# Altium footprint library PCB1.PcbLib: 10 footprints
Each footprint in its own frame and in the unit in brackets; x right, y up, seen from the top. Pads: shape width x height; smd on the part's side, far side on the other; paste and mask are expansions set on the pad; w line width, h text height; cw(c..) or ccw(c..) is an arc to the next point about the centre after c.
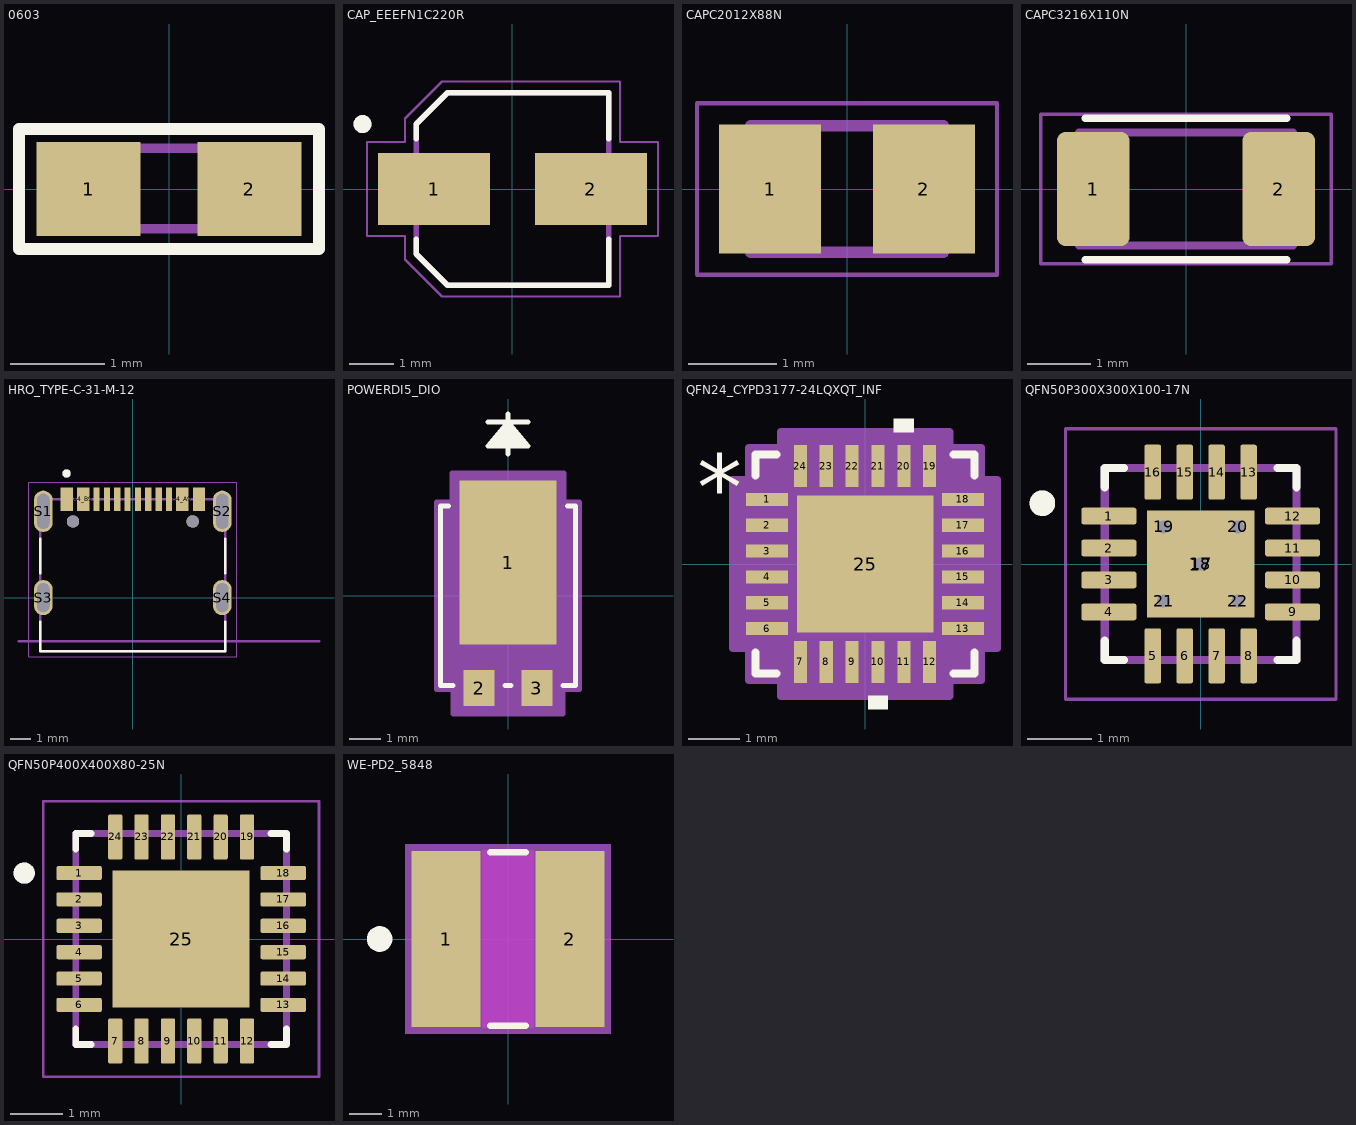
[diagram p0: the footprints below, top view; thin cyan lines are the x and y axes]

## 0603 [mm]
pads (2):
  rect 1.1x1 smd: 1(-0.85,0) 2(0.85,0)
Top Overlay:
  lines w0.127: -1.587,-0.635 -1.587,0.635 1.587,0.635 1.587,-0.635 -1.587,-0.635
Mechanical 13:
  region: -0.338,-0.47 -0.838,-0.47 -0.838,0.48 -0.338,0.48
  region: 0.83,-0.47 0.33,-0.47 0.33,0.48 0.83,0.48
  lines w0.102: -0.356,-0.419 0.356,-0.419 ; -0.356,0.432 0.356,0.432
3D body "step_temp.STEP": height 0.55, standoff 0, extent -0.8,-0.4 0.8,0.4

## CAP_EEEFN1C220R [mm]
pads (2):
  rect 2.5x1.6 smd: 1(-1.75,0) 2(1.75,0)
Top Overlay:
  circle w0.2: c-3.35,1.45 r0.1
  lines w0.127: -2.15,-1.12 -2.15,-1.45 -1.45,-2.15 2.15,-2.15 2.15,-1.12 ; -2.15,1.12 -2.15,1.45 -1.45,2.15 2.15,2.15 2.15,1.12
Mechanical 13:
  circle w0.2: c-3.35,1.45 r0.1
  lines w0.127: -2.15,-1.45 -2.15,1.45 -1.45,2.15 2.15,2.15 2.15,-2.15 -1.45,-2.15 -2.15,-1.45
Mechanical 15:
  lines w0.05: -3.25,-1.05 -2.4,-1.05 -2.4,-1.575 -1.575,-2.4 2.4,-2.4 2.4,-1.05 3.25,-1.05 3.25,1.05 2.4,1.05 2.4,2.4 -1.575,2.4 -2.4,1.575 -2.4,1.05 -3.25,1.05 -3.25,-1.05
3D body "step_temp.STEP": height 5.3, standoff -0.5, extent -2.5,-2.15 2.5,2.15

## CAPC2012X88N [mm]
pads (2):
  rect 1.16x1.47 smd: 1(-0.875,0) 2(0.875,0)
Mechanical 13:
  lines w0.127: -1.1,-0.72 -1.1,0.72 1.1,0.72 1.1,-0.72 -1.1,-0.72
Mechanical 15:
  lines w0.05: -1.708,-0.975 -1.708,0.975 1.708,0.975 1.708,-0.975 -1.708,-0.975
3D body "step_temp.STEP": height 1.4, standoff 0, extent -1.016,-0.635 1.016,0.635

## CAPC3216X110N [mm]
pads (2):
  rrect25% 1.16x1.82 smd: 1(-1.475,0) 2(1.475,0)
Top Overlay:
  lines w0.127: -1.6,-1.125 1.6,-1.125 ; -1.6,1.125 1.6,1.125
Mechanical 13:
  lines w0.127: -1.7,-0.9 -1.7,0.9 1.7,0.9 1.7,-0.9 -1.7,-0.9
Mechanical 15:
  lines w0.05: -2.31,-1.189 -2.31,1.189 2.31,1.189 2.31,-1.189 -2.31,-1.189
3D body "step_temp.STEP": height 1.8, standoff 0, extent -1.6,-0.8 1.6,0.8

## HRO_TYPE-C-31-M-12 [mm]
pads (18):
  rect 0.6x1.14 smd mask+0.05: A1_B12(-3.2,4.75) A4_B9(-2.4,4.75) B1_A12(3.2,4.75) B4_A9(2.4,4.75)
  rect 0.3x1.14 smd mask+0.05: A5(-1.25,4.75) A6(-0.25,4.75) A7(0.25,4.75) A8(1.25,4.75) B5(1.75,4.75) B6(0.75,4.75) B7(-0.75,4.75) B8(-1.75,4.75)
  oval 0.9x2 hole 0.6 slot 1.7 at 90 deg: S1(-4.325,4.17) S2(4.325,4.17)
  oval 0.9x1.7 hole 0.6 slot 1.4 at 90 deg: S3(-4.325,0) S4(4.325,0)
  round 0.6 hole 0.6 unplated: ""(-2.89,3.68) ""(2.89,3.68)
Top Overlay:
  circle w0.2: c-3.2,6 r0.1
  lines w0.127: -4.47,-1.17 -4.47,-2.6 4.47,-2.6 4.47,-1.17 ; -4.47,1.17 -4.47,2.85 ; 4.47,1.17 4.47,2.85
Mechanical 13:
  circle w0.2: c-3.2,6 r0.1
  lines w0.127: -5.5,-2.11 9,-2.11 ; -4.47,-2.6 -4.47,4.75 4.47,4.75 4.47,-2.6 -4.47,-2.6
  text "PCB EDGE" at 5.2,-1.9 h0.61
Mechanical 15:
  lines w0.05: -5.025,-2.85 5.025,-2.85 5.025,5.57 -5.025,5.57 -5.025,-2.85
3D body "step_temp.STEP": height 3.18, standoff -1.12, extent -4.47,-2.6 4.47,5.305

## POWERDI5_DIO [mil]
pads (3):
  rect 122x205 smd paste+0 mask+0: 1(0,41.5)
  rect 39x45 smd paste+0 mask+0: 2(-36.22,-115.5) 3(36.22,-115.5)
Top Overlay:
  lines w6: -74.1,112.5 -84.5,112.5 -84.5,-112.5 -68.82,-112.5 ; -25,217.5 25,217.5 ; -20,187.5 0,217.5 ; -15,187.5 0,217.5 ; -10,187.5 0,217.5 ; -5,187.5 0,217.5 ; -3.62,-112.5 3.62,-112.5 ; 0,177.5 0,227.5 ; 5,187.5 0,217.5 ; 10,187.5 0,217.5 ; 15,187.5 0,217.5 ; 20,187.5 0,217.5 ; 68.82,-112.5 84.5,-112.5 84.5,112.5 74.1,112.5 ; 0,217.5 25,187.5 -25,187.5 0,217.5
  text ".Designator" at -137.5,-25 h50
Mechanical 13:
  lines w1: -25,217.5 25,217.5 ; -20,187.5 0,217.5 ; -15,187.5 0,217.5 ; -10,187.5 0,217.5 ; -5,187.5 0,217.5 ; 0,177.5 0,227.5 ; 5,187.5 0,217.5 ; 10,187.5 0,217.5 ; 15,187.5 0,217.5 ; 20,187.5 0,217.5 ; 0,217.5 25,187.5 -25,187.5 0,217.5 ; -79.5,-107.5 79.5,-107.5 79.5,107.5 -79.5,107.5 -79.5,-107.5
  text ".Designator" at -137.5,-25 h50
Mechanical 15:
  region: -68.72,-117.5 -89.5,-117.5 -89.5,117.5 -70,117.5 -70,154 70,154 70,117.5 89.5,117.5 89.5,-117.5 68.72,-117.5 68.72,-148 -68.72,-148
  region: 79.5,-107.5 -79.5,-107.5 -79.5,107.5 79.5,107.5
  lines w6: -89.5,-117.5 -89.5,117.5 -70,117.5 -70,154 70,154 70,117.5 89.5,117.5 89.5,-117.5 68.72,-117.5 68.72,-148 -68.72,-148 -68.72,-117.5 -89.5,-117.5
3D body "POWERDI5_DIO.step": height 47.09, standoff 0, extent -79.49,-130 79.49,130

## QFN24_CYPD3177-24LQXQT_INF [mil]
pads (25):
  rect 32x10 smd paste-99999 mask+0: 1(-74.5,49.21) 2(-74.5,29.53) 3(-74.5,9.84) 4(-74.5,-9.84) 5(-74.5,-29.53) 6(-74.5,-49.21) 13(74.5,-49.21) 14(74.5,-29.53) 15(74.5,-9.84) 16(74.5,9.84) 17(74.5,29.53) 18(74.5,49.21)
  rect 10x32 smd paste-99999 mask+0: 7(-49.21,-74.5) 8(-29.53,-74.5) 9(-9.84,-74.5) 10(9.84,-74.5) 11(29.53,-74.5) 12(49.21,-74.5) 19(49.21,74.5) 20(29.53,74.5) 21(9.84,74.5) 22(-9.84,74.5) 23(-29.53,74.5) 24(-49.21,74.5)
  rect 104x104 smd paste-99999 mask+0: 25(0,0)
Top Overlay:
  region: 37.03,100.5 22.03,100.5 22.03,110.5 37.03,110.5
  region: 17.34,-100.5 2.34,-100.5 2.34,-110.5 17.34,-110.5
  lines w6: -83.5,-67.31 -83.5,-83.5 -67.31,-83.5 ; -83.5,67.31 -83.5,83.5 -67.31,83.5 ; 67.31,-83.5 83.5,-83.5 83.5,-67.31 ; 67.31,83.5 83.5,83.5 83.5,67.31
  text ".Designator" at -137.5,-25 h50
  text "*" at -128,34.06 h50
Top Paste:
  region: 48.06,-3.94 3.94,-3.94 3.94,-48.06 48.06,-48.06
  region: 48.06,48.06 3.94,48.06 3.94,3.94 48.06,3.94
  region: -3.94,-3.94 -48.06,-3.94 -48.06,-48.06 -3.94,-48.06
  region: -3.94,48.06 -48.06,48.06 -48.06,3.94 -3.94,3.94
Mechanical 13:
  lines w1: -78.5,28.5 -28.5,78.5 ; -78.5,-78.5 -78.5,78.5 78.5,78.5 78.5,-78.5 -78.5,-78.5 ; -78.5,-55.21 -78.5,-43.21 -78.5,-55.21 ; -78.5,-35.53 -78.5,-23.53 -78.5,-35.53 ; -78.5,-15.84 -78.5,-3.84 -78.5,-15.84 ; -78.5,3.84 -78.5,15.84 -78.5,3.84 ; -78.5,23.53 -78.5,35.53 -78.5,23.53 ; -78.5,43.21 -78.5,55.21 -78.5,43.21 ; -55.21,-78.5 -43.21,-78.5 -55.21,-78.5 ; -55.21,78.5 -43.21,78.5 -55.21,78.5 ; -35.53,-78.5 -23.53,-78.5 -35.53,-78.5 ; -35.53,78.5 -23.53,78.5 -35.53,78.5 ; -15.84,-78.5 -3.84,-78.5 -15.84,-78.5 ; -15.84,78.5 -3.84,78.5 -15.84,78.5 ; 3.84,-78.5 15.84,-78.5 3.84,-78.5 ; 3.84,78.5 15.84,78.5 3.84,78.5 ; 23.53,-78.5 35.53,-78.5 23.53,-78.5 ; 23.53,78.5 35.53,78.5 23.53,78.5 ; 43.21,-78.5 55.21,-78.5 43.21,-78.5 ; 43.21,78.5 55.21,78.5 43.21,78.5 ; 78.5,-55.21 78.5,-43.21 78.5,-55.21 ; 78.5,-35.53 78.5,-23.53 78.5,-35.53 ; 78.5,-15.84 78.5,-3.84 78.5,-15.84 ; 78.5,3.84 78.5,15.84 78.5,3.84 ; 78.5,23.53 78.5,35.53 78.5,23.53 ; 78.5,43.21 78.5,55.21 78.5,43.21
  text "*" at -71,34.06 h50
  text ".Designator" at -137.5,-25 h50
Mechanical 15:
  region: -64.21,-88.5 -88.5,-88.5 -88.5,-64.21 -100.5,-64.21 -100.5,64.21 -88.5,64.21 -88.5,88.5 -64.21,88.5 -64.21,100.5 64.21,100.5 64.21,88.5 88.5,88.5 88.5,64.21 100.5,64.21 100.5,-64.21 88.5,-64.21 88.5,-88.5 64.21,-88.5 64.21,-100.5 -64.21,-100.5
  lines w6: -100.5,-64.21 -100.5,64.21 -88.5,64.21 -88.5,88.5 -64.21,88.5 -64.21,100.5 64.21,100.5 64.21,88.5 88.5,88.5 88.5,64.21 100.5,64.21 100.5,-64.21 88.5,-64.21 88.5,-88.5 64.21,-88.5 64.21,-100.5 -64.21,-100.5 -64.21,-88.5 -88.5,-88.5 -88.5,-64.21 -100.5,-64.21
3D body "QFN24_CYPD3177-24LQXQT_INF.step": height 24.09, standoff 0, extent -78.5,-78.5 78.5,78.5

## QFN50P300X300X100-17N [mm]
pads (22):
  rrect25% 0.86x0.26 smd: 1(-1.435,0.75) 2(-1.435,0.25) 3(-1.435,-0.25) 4(-1.435,-0.75) 9(1.435,-0.75) 10(1.435,-0.25) 11(1.435,0.25) 12(1.435,0.75)
  rrect25% 0.26x0.86 smd: 5(-0.75,-1.435) 6(-0.25,-1.435) 7(0.25,-1.435) 8(0.75,-1.435) 13(0.75,1.435) 14(0.25,1.435) 15(-0.25,1.435) 16(-0.75,1.435)
  rect 1.68x1.68 smd paste-2539.97: 17(0,0)
  round 0.4 hole 0.2 mask+0: 18(0,0) 19(-0.58,0.58) 20(0.58,0.58) 21(-0.58,-0.58) 22(0.58,-0.58)
Top Overlay:
  circle w0.2: c-2.475,0.95 r0.1
  lines w0.127: -1.5,-1.2 -1.5,-1.5 -1.2,-1.5 ; -1.5,1.2 -1.5,1.5 -1.2,1.5 ; 1.2,-1.5 1.5,-1.5 1.5,-1.2 ; 1.2,1.5 1.5,1.5 1.5,1.2
Mechanical 13:
  circle w0.2: c-2.475,0.95 r0.1
  lines w0.127: -1.5,-1.5 -1.5,1.5 1.5,1.5 1.5,-1.5 -1.5,-1.5
Mechanical 15:
  lines w0.05: -2.115,-2.115 -2.115,2.115 2.115,2.115 2.115,-2.115 -2.115,-2.115
3D body "step_temp.STEP": height 1, standoff 0, extent -1.5,-1.5 1.5,1.5

## QFN50P400X400X80-25N [mm]
pads (25):
  rrect25% 0.86x0.27 smd: 1(-1.935,1.25) 2(-1.935,0.75) 3(-1.935,0.25) 4(-1.935,-0.25) 5(-1.935,-0.75) 6(-1.935,-1.25) 13(1.935,-1.25) 14(1.935,-0.75) 15(1.935,-0.25) 16(1.935,0.25) 17(1.935,0.75) 18(1.935,1.25)
  rrect25% 0.27x0.86 smd: 7(-1.25,-1.935) 8(-0.75,-1.935) 9(-0.25,-1.935) 10(0.25,-1.935) 11(0.75,-1.935) 12(1.25,-1.935) 19(1.25,1.935) 20(0.75,1.935) 21(0.25,1.935) 22(-0.25,1.935) 23(-0.75,1.935) 24(-1.25,1.935)
  rect 2.6x2.6 smd paste-2539.97: 25(0,0)
Top Overlay:
  circle w0.2: c-2.975,1.25 r0.1
  lines w0.127: -2,-1.705 -2,-2 -1.705,-2 ; -2,1.705 -2,2 -1.705,2 ; 1.705,-2 2,-2 2,-1.705 ; 1.705,2 2,2 2,1.705
Mechanical 13:
  circle w0.2: c-2.975,1.25 r0.1
  lines w0.127: -2,-2 2,-2 2,2 -2,2 -2,-2
Mechanical 15:
  lines w0.05: -2.615,-2.615 2.615,-2.615 2.615,2.615 -2.615,2.615 -2.615,-2.615
3D body "step_temp.STEP": height 0.8, standoff 0, extent -2,-2 2,2

## WE-PD2_5848 [mm]
pads (2):
  rect 2.15x5.5 smd paste-2539.97 mask+0.102: 1(-1.925,0) 2(1.925,0)
Top Overlay:
  circle w0.4: c-4,0 r0.2
  lines w0.2: -0.55,-2.7 0.55,-2.7 ; -0.55,2.7 0.55,2.7
Keep-Out Layer:
  region: 0.8,-2.75 -0.8,-2.75 -0.8,2.75 0.8,2.75
Mechanical 13:
  lines w0.1: -1.29,-2.6 1.28,-2.6 1.56,-2.45 ; -1.28,-2.6 -1.38,-2.55 -1.58,-2.43 -1.75,-2.31 -1.98,-2.12 -2.15,-1.95 -2.32,-1.75 -2.46,-1.53 -2.58,-1.32 -2.7,-1.06 -2.79,-0.79 -2.86,-0.5 -2.9,-0.2 -2.9,0.05 -2.88,0.35 -2.82,0.7 -2.74,0.97 -2.59,1.31 -2.42,1.6 -2.24,1.84 -1.98,2.11 -1.74,2.32 -1.53,2.47 -1.44,2.53 -1.29,2.6 1.29,2.6 1.39,2.56 1.55,2.45 1.75,2.31 1.94,2.15 2.14,1.97 2.33,1.72 2.51,1.45 2.65,1.17 2.77,0.88 2.86,0.49 2.9,0.05 2.88,-0.36 2.81,-0.72 2.71,-1.04 2.55,-1.39 2.34,-1.71 2.11,-1.99 1.84,-2.25 1.54,-2.46
Mechanical 15:
  region: 3.2,-2.95 -3.2,-2.95 -3.2,2.95 3.2,2.95
3D body "step_temp.STEP": height 4.5, standoff 0, extent -2.889,-2.6 2.899,2.6